# Altium schematic symbol library 2019-12-06_20-32-57.SchLib: 2 symbols
Pins are listed as number, name and electrical type; pins without a type are passive.

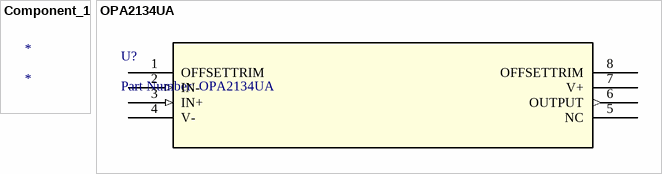
[diagram p0: symbols Component_1 to OPA2134UA]

## Component_1
designator *

## OPA2134UA
designator U?, comment Part Number: OPA2134UA
No Description Available; Vendor: Texas Instruments; Built_By: EMA_UL_Team; Manufacturer_Part_Number: OPA2134UA; Copyright: Copyright (C) 2018 Accelerated Designs. All rights reserved; RefDes: RefDes; Type: DEV; Value: Value
footprint D8
pins: 1 OFFSETTRIM, 2 IN- (in), 3 IN+ (in), 4 V- (power), 5 NC, 6 OUTPUT (out), 7 V+ (power), 8 OFFSETTRIM